# Altium schematic symbol library LEB9055B-05B-2.7-5.0-R.SchLib: 1 symbol
Pins are listed as number, name and electrical type; pins without a type are passive.

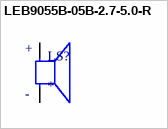
[diagram p0: symbol LEB9055B-05B-2.7-5.0-R]

## LEB9055B-05B-2.7-5.0-R
designator LS?
MF: PUI Audio; MP: AI-1027-TWT-3V-R; SnapEDA_Link: https://www.snapeda.com/parts/AI-1027-TWT-3V-R/PUI+Audio%252C+Inc./view-part/?ref=snap; Package: None; Value: *; Check_prices: https://www.snapeda.com/parts/AI-1027-TWT-3V-R/PUI+Audio%252C+Inc./view-part/?ref=eda
footprint XDCR_AI-1027-TWT-3V-R
pins: N, P
text: +; -